# Altium footprint library PCB1.PcbLib: 48 footprints (part 1 of 3)
Each footprint in its own frame and in the unit in brackets; x right, y up, seen from the top. Pads: shape width x height; smd on the part's side, far side on the other; paste and mask are expansions set on the pad; w line width, h text height; cw(c..) or ccw(c..) is an arc to the next point about the centre after c.
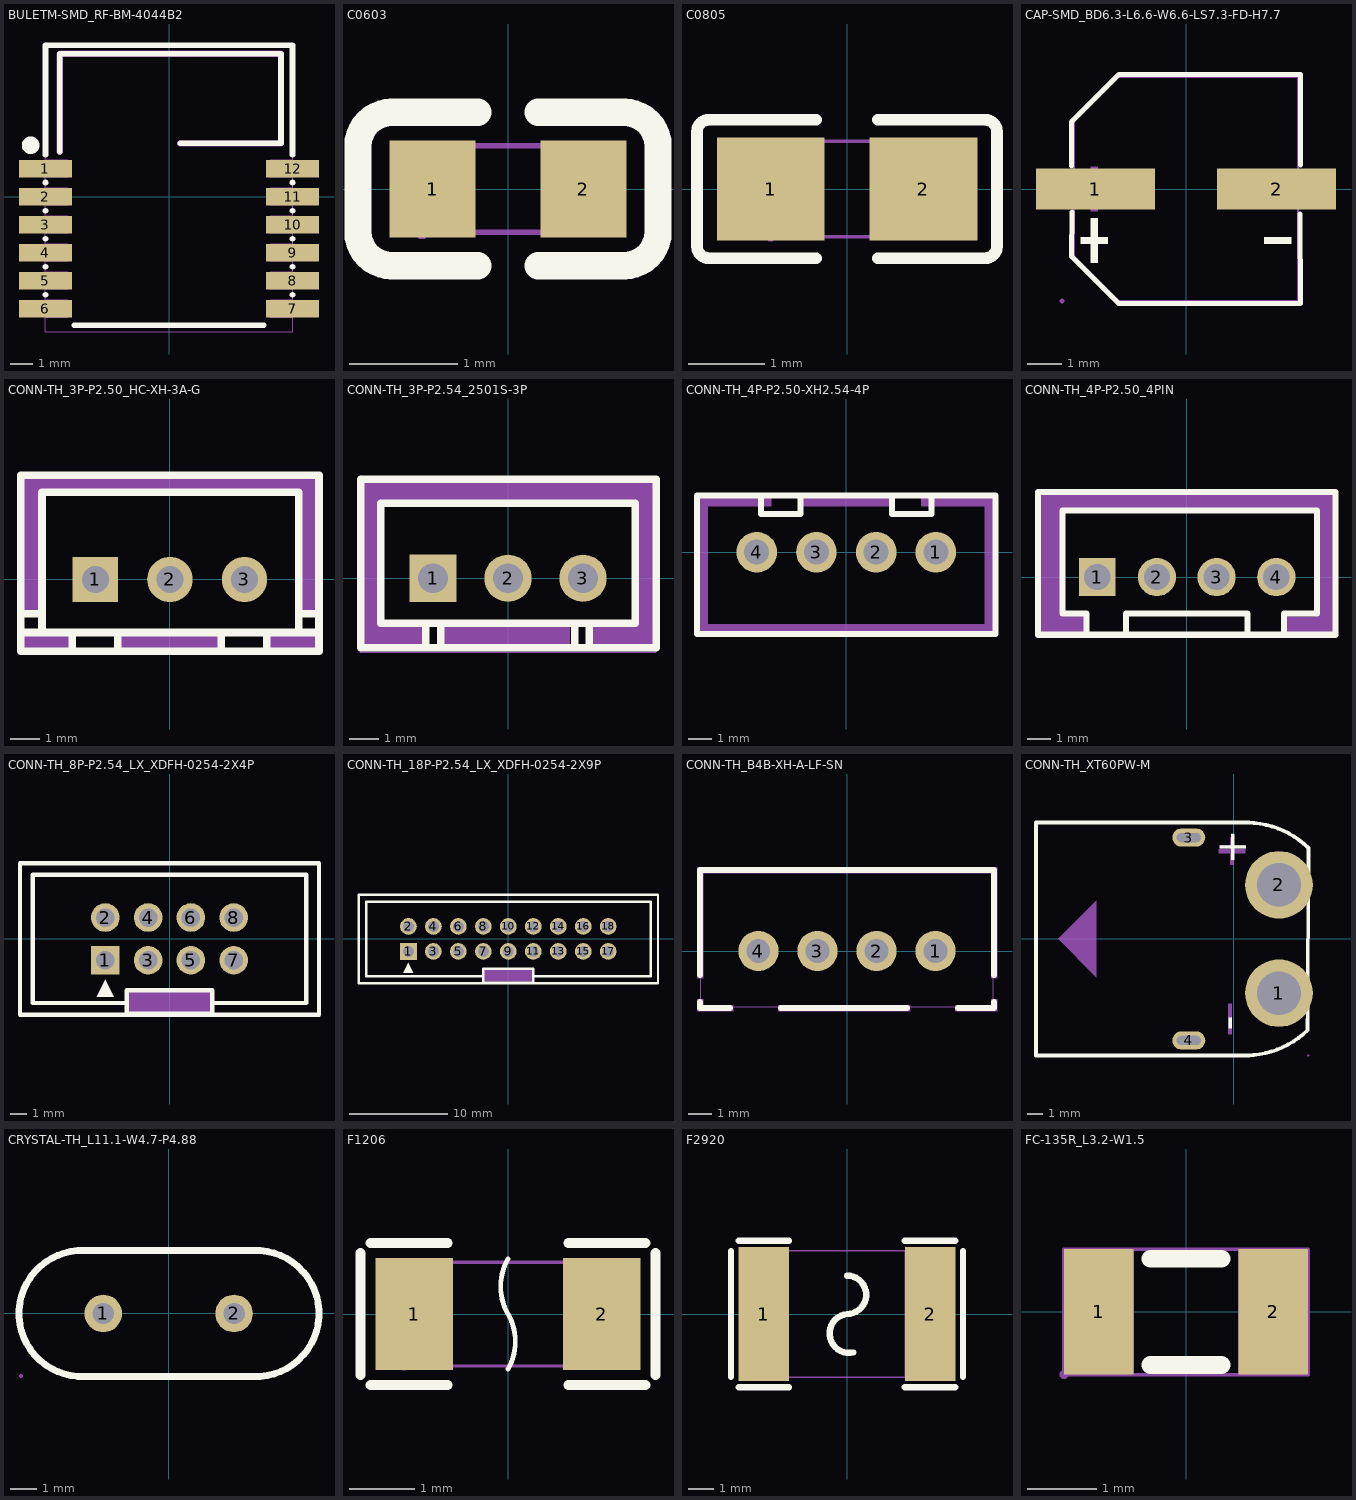
[diagram p0: the footprints below, top view; thin cyan lines are the x and y axes]

## BULETM-SMD_RF-BM-4044B2 [mil]
pads (12):
  rect 94.5x31.5 smd: 1(-220.5,50.5) 2(-220.5,0.5) 3(-220.5,-49.5) 4(-220.5,-99.5) 5(-220.5,-149.5) 6(-220.5,-199.5) 7(220.5,-199.5) 8(220.5,-149.5) 9(220.5,-99.5) 10(220.5,-49.5) 11(220.5,0.5) 12(220.5,50.5)
Top Overlay:
  circle w15.7: c-247.1,92.2 r7.9
  lines w10: -220.5,-174.7 -220.5,-174.4 ; -220.5,-124.7 -220.5,-124.4 ; -220.5,-74.7 -220.5,-74.4 ; -220.5,-24.7 -220.5,-24.4 ; -220.5,25.3 -220.5,25.6 ; -220.5,75.4 -220.5,270.5 220.5,270.5 220.5,225.3 220.5,75.3 ; -195,80.5 -195,255.5 200,255.5 200,95.5 20,95.5 ; -168.8,-229.2 168.8,-229.2 ; 220.5,-174.7 220.5,-174.4 ; 220.5,-124.7 220.5,-124.4 ; 220.5,-74.7 220.5,-74.4 ; 220.5,-24.7 220.5,-24.4 ; 220.5,25.3 220.5,25.6
Mechanical 6:
  circle w15.7: c-220.5,50.5 r7.9
  region: -200,80.5 -200,255.5 -200,256.49 -199.24,258.33 -197.83,259.74 -195.99,260.5 -195,260.5 200,260.5 200.99,260.5 202.83,259.74 204.24,258.33 205,256.49 205,255.5 205,95.5 205,94.51 204.24,92.67 202.83,91.26 200.99,90.5 200,90.5 20,90.5 17.93,90.5 15,93.43 15,97.57 17.93,100.5 20,100.5 195,100.5 195,250.5 -190,250.5 -190,80.5 -190,78.43 -192.93,75.5 -197.07,75.5 -200,78.43 -200,80.5
Mechanical 7:
  lines w2: -220.5,-240.5 -220.5,272.5 220.5,272.5 220.5,-240.5 -220.5,-240.5
Mechanical 8:
  region: -218.1,272.5 -218.1,271.51 -219.51,270.1 -221.49,270.1 -222.9,271.51 -222.9,272.5 -222.9,273.49 -221.49,274.9 -219.51,274.9 -218.1,273.49 -218.1,272.5
Mechanical 9:
  region: 220.5,-183.8 220.5,-215.3 181.1,-215.3 181.1,-183.8
  region: 220.5,-133.8 220.5,-165.3 181.1,-165.3 181.1,-133.8
  region: 220.5,-83.8 220.5,-115.3 181.1,-115.3 181.1,-83.8
  region: 220.5,-33.8 220.5,-65.3 181.1,-65.3 181.1,-33.8
  region: 220.5,16.2 220.5,-15.3 181.1,-15.3 181.1,16.2
  region: 220.5,66.2 220.5,34.7 181.1,34.7 181.1,66.2
  region: -181.1,66.2 -181.1,34.7 -220.5,34.7 -220.5,66.2
  region: -181.1,16.2 -181.1,-15.3 -220.5,-15.3 -220.5,16.2
  region: -181.1,-33.8 -181.1,-65.3 -220.5,-65.3 -220.5,-33.8
  region: -181.1,-83.8 -181.1,-115.3 -220.5,-115.3 -220.5,-83.8
  region: -181.1,-133.8 -181.1,-165.3 -220.5,-165.3 -220.5,-133.8
  region: -181.1,-183.8 -181.1,-215.3 -220.5,-215.3 -220.5,-183.8

## C0603 [mil]
pads (2):
  rect 31.5x35.4 smd: 1(-27.6,0) 2(27.5,0)
Top Overlay:
  lines w10: -11.1,-27.9 -42.6,-27.9 cw(c-42.6,-15.7) -54.8,-15.7 -54.8,15.8 cw(c-42.6,15.8) -42.6,28 -11.1,28 ; 11,-27.9 42.5,-27.9 ccw(c42.5,-15.7) 54.7,-15.7 54.7,15.8 ccw(c42.5,15.8) 42.5,28 11,28
Mechanical 7:
  lines w2: -31.5,-15.7 -31.5,15.8 31.5,15.8 31.5,-15.7 -31.5,-15.7
Mechanical 8:
  region: -29.1,-15.7 -29.1,-16.69 -30.51,-18.1 -32.49,-18.1 -33.9,-16.69 -33.9,-15.7 -33.9,-14.71 -32.49,-13.3 -30.51,-13.3 -29.1,-14.71 -29.1,-15.7 -29.2,-15.7
Mechanical 9:
  region: -31.5,-15.7 -31.5,15.8 -19.7,15.8 -19.7,-15.7
  region: 31.5,-15.7 31.5,15.8 19.6,15.8 19.6,-15.7

## C0805 [mil]
pads (2):
  rect 55.5x53.1 smd paste-3937 mask+2: 1(-39.3,0) 2(39.4,0)
Top Overlay:
  lines w6: -15.8,-35.6 -71.3,-35.6 cw(c-71.3,-29.6) -77.3,-29.6 -77.3,29.6 cw(c-71.3,29.6) -71.3,35.6 -15.8,35.6 ; 15.8,-35.6 71.3,-35.6 ccw(c71.3,-29.6) 77.3,-29.6 77.3,29.6 ccw(c71.3,29.6) 71.3,35.6 15.8,35.6
Top Paste:
  region: 67.2,25.2 67.2,-25.2 65.2,-27.2 19.9,-27.2 17.9,-25.2 17.7,-9.1 35.5,-9.1 35.5,8.7 18.1,8.7 17.9,25.2 19.9,27.2 65.2,27.2
  region: -67.1,-25.2 -67.1,25.2 -65.1,27.2 -19.9,27.2 -17.9,25.2 -17.7,9.1 -35.4,9.1 -35.4,-8.7 -18.1,-8.7 -17.9,-25.2 -19.9,-27.2 -65.1,-27.2
Mechanical 7:
  lines w2: -39.3,-24.6 39.4,-24.6 39.4,24.6 -39.3,24.6 -39.3,-24.6
Mechanical 8:
  region: -36.9,-24.6 -36.9,-25.59 -38.31,-27 -40.29,-27 -41.7,-25.59 -41.7,-24.6 -41.7,-23.61 -40.29,-22.2 -38.31,-22.2 -36.9,-23.61 -36.9,-24.6 -37,-24.6
Mechanical 9:
  region: 39.4,24.6 39.4,-24.6 19.7,-24.6 19.7,24.6
  region: -39.3,-24.6 -39.3,24.6 -19.7,24.6 -19.7,-24.6

## CAP-SMD_BD6.3-L6.6-W6.6-LS7.3-FD-H7.7 [mil]
pads (2):
  rect 137.8x47.2 smd: 1(-105.1,0) 2(105.1,0)
Top Overlay:
  region: -110.4,-33.8 -110.4,-85.8 -102.6,-85.8 -102.6,-33.8
  region: -122.1,-55.9 -122.1,-63.7 -90.9,-63.7 -90.9,-55.9
  region: 122.1,-55.9 122.1,-63.7 91,-63.7 91,-55.9
  lines w6: -132.9,27 -132.9,77.9 -77.9,132.9 132.9,132.9 132.7,27.8 ; -132.4,-27 -132.9,-78 -78,-132.9 132.9,-132.9 132.1,-29.1
Mechanical 6:
  region: -110.4,26 -110.4,-26 -102.6,-26 -102.6,26
  region: -122.1,3.9 -122.1,-3.9 -90.9,-3.9 -90.9,3.9
  region: 122.1,3.9 122.1,-3.9 91,-3.9 91,3.9
Mechanical 7:
  lines w2: -129.9,-78 -129.9,77.9 -77.9,129.9 129.9,129.9 129.9,-129.9 -77.9,-129.9 -129.9,-78
Mechanical 8:
  region: -141.4,-129.9 -141.4,-130.89 -142.81,-132.3 -144.79,-132.3 -146.2,-130.89 -146.2,-129.9 -146.2,-128.91 -144.79,-127.5 -142.81,-127.5 -141.4,-128.91 -141.4,-129.9
Mechanical 9:
  region: 39.3,13.8 143.7,13.8 143.7,-13.8 39.3,-13.8
  region: -143.8,13.8 -39.4,13.8 -39.4,-13.8 -143.8,-13.8

## CONN-TH_3P-P2.50_HC-XH-3A-G [mil]
pads (3):
  rect 60x60 hole 36 paste-99999 mask+2: 1(-98.4,0)
  round 60 hole 36 paste-99999 mask+2: 2(0,0) 3(98.4,0)
Top Overlay:
  lines w10: -196.9,-70 -170,-70 ; -196.9,-45 -170,-45 ; -129,-94.5 -129,-70 ; -69,-94.5 -69,-70 ; 67.9,-94.5 67.9,-70 ; 127.9,-94.5 127.9,-70 ; 170,-45 196.8,-45 ; 196.8,-70 170,-70 ; 170,-70 -168.9,-70 -168.9,115 170,115 170,-70 ; -196.9,-94.5 -196.9,137.8 196.8,137.8 196.8,-94.5 -196.9,-94.5
Mechanical 6:
  region: 196.8,-70 127.9,-70 130,-95 196.8,-94.5
  region: 67.9,-70 70,-95 -69,-94.5 -69,-70
  region: 196.8,-45 170,-45 170,115 -170,115 -170,-45 -196.9,-45 -196.9,137.8 196.8,137.8
  region: -129,-70 -129,-93.4 -130,-94.5 -196.9,-94.5 -196.9,-70
Mechanical 7:
  lines w2: -196.9,-94.5 196.8,-94.5 196.8,137.8 -196.9,137.8 -196.9,-94.5
Mechanical 8:
  region: -194.5,-94.5 -194.5,-95.49 -195.91,-96.9 -197.89,-96.9 -199.3,-95.49 -199.3,-94.5 -199.3,-93.51 -197.89,-92.1 -195.91,-92.1 -194.5,-93.51 -194.5,-94.5
Mechanical 9:
  region: -108.3,9.8 -88.6,9.8 -88.6,-9.9 -108.3,-9.9
  region: -9.9,9.8 9.8,9.8 9.8,-9.9 -9.9,-9.9
  region: 88.6,9.8 108.3,9.8 108.3,-9.9 88.6,-9.9

## CONN-TH_3P-P2.54_2501S-3P [mil]
pads (3):
  rect 63x63 hole 39.4: 1(-100,0)
  round 63 hole 39.4: 2(0,0) 3(100,0)
Top Overlay:
  lines w10: -110,-92.5 -110,-60 ; -89.7,-92.5 -89.7,-60 ; 89.3,-92.5 89.3,-60 ; 108.3,-92.5 108.3,-60 ; -196.1,-92.5 197.6,-92.5 197.6,131.9 -196.1,131.9 -196.1,-92.5 ; -170,-60 -170,100 170,100 170,-60 -170,-60
Mechanical 6:
  region: 110,-90 110,-60 170,-60 170,100 -170,100 -170,-60 -110,-60 -110,-90 -200,-90 -200,130 200,130 200,-90
  region: -87.4,-90.5 82.6,-90.5 82.6,-60.5 -87.4,-60.5
Mechanical 7:
  lines w2: -196.8,-98.4 196.8,-98.4 196.8,133.9 -196.8,133.9 -196.8,-98.4
Mechanical 8:
  region: -194.4,133.9 -194.4,132.91 -195.81,131.5 -197.79,131.5 -199.2,132.91 -199.2,133.9 -199.2,134.89 -197.79,136.3 -195.81,136.3 -194.4,134.89 -194.4,133.9 -194.5,133.9
Mechanical 9:
  region: -112.8,12.8 -87.2,12.8 -87.2,-12.7 -112.8,-12.7
  region: -12.8,12.8 12.8,12.8 12.8,-12.8 -12.8,-12.8
  region: 87.2,12.8 112.8,12.8 112.8,-12.8 87.2,-12.8

## CONN-TH_4P-P2.50-XH2.54-4P [mil]
pads (4):
  round 66.9 hole 41.3 paste-99999 mask+2: 1(147.6,0) 2(49.2,0) 3(-49.2,0) 4(-147.7,0)
Top Overlay:
  lines w10: -246.1,-134.8 -246.1,93.5 246,93.5 246,-134.8 -245.7,-134.8 -246.1,-134.4 ; -140.8,93.5 -140.8,63 -75.3,63 -75.3,91.6 -77.2,93.5 ; 75.3,93.5 75.3,63 140.7,63 140.7,91.6 138.9,93.5
Mechanical 6:
  region: -78.8,91.6 78.7,91.6 78.7,75.8 -78.8,75.8
  region: 246,91.6 246,-134.8 -246.1,-134.8 -246.1,91.6 -123.3,91.6 -123.3,75.8 -228.4,75.8 -228.4,-119 228.3,-119 228.3,75.8 123.2,75.8 123.2,91.6
Mechanical 7:
  lines w2: -246.1,-134.8 -246.1,93.5 246,93.5 246,-134.8 -246.1,-134.8
Mechanical 8:
  region: 248.4,93.5 248.4,92.51 246.99,91.1 245.01,91.1 243.6,92.51 243.6,93.5 243.6,94.49 245.01,95.9 246.99,95.9 248.4,94.49 248.4,93.5
Mechanical 9:
  region: 160.2,-12.6 135,-12.6 135,12.6 160.2,12.6
  region: 61.8,-12.6 36.6,-12.6 36.6,12.6 61.8,12.6
  region: -36.6,-12.6 -61.8,-12.6 -61.8,12.6 -36.6,12.6
  region: -135.1,-12.6 -160.3,-12.6 -160.3,12.6 -135.1,12.6

## CONN-TH_4P-P2.50_4PIN [mil]
pads (4):
  rect 60x63 hole 43.3: 1(-147.7,0)
  round 63 hole 43.3: 2(-49.2,0) 3(49.2,0) 4(147.6,0)
Top Overlay:
  lines w10: -165,-95 -165,-90 -165,-60 -205,-60 -205,110 215,110 215,-60 160,-60 160,-90 ; -100,-95 -100,-60 100,-60 100,-95 ; -245,-95 245,-95 245,140 -245,140 -245,-95
Mechanical 6:
  region: 160,-95 160,-65 210,-65 215,-60 215,110 -205,110 -205,-60 -165,-60 -165,-95 -245,-95 -245,140 245,140 245,-95
Mechanical 7:
  lines w2: -246.1,-94.4 -246.1,137.8 246,137.8 246,-94.4 -246.1,-94.4
Mechanical 8:
  region: -243.7,-94.4 -243.7,-95.39 -245.11,-96.8 -247.09,-96.8 -248.5,-95.39 -248.5,-94.4 -248.5,-93.41 -247.09,-92 -245.11,-92 -243.7,-93.41 -243.7,-94.4
Mechanical 9:
  region: -160.3,12.6 -135.1,12.6 -135.1,-12.6 -160.3,-12.6
  region: -61.8,12.6 -36.6,12.6 -36.6,-12.6 -61.8,-12.6
  region: 36.6,12.6 61.8,12.6 61.8,-12.6 36.6,-12.6
  region: 135,12.6 160.2,12.6 160.2,-12.6 135,-12.6

## CONN-TH_8P-P2.54_LX_XDFH-0254-2X4P [mil]
pads (8):
  rect 66.9x66.9 hole 43.3 paste-99999 mask+2: 1(-150,-50)
  round 66.9 hole 43.3 paste-99999 mask+2: 2(-150,50) 3(-50,-50) 4(-50,50) 5(50,-50) 6(50,50) 7(150,-50) 8(150,50)
Top Overlay:
  region: -150,-95 -130,-135 -170,-135
  lines w10: -100,-150 -320,-150 -320,150 320,150 320,-150 100,-150 ; -349.6,-177.2 -349.6,177.2 349.6,177.2 349.6,-177.2 -349.6,-177.2 ; -100,-175 -100,-120 100,-120 100,-175 -100,-175
Mechanical 6:
  region: -100.4,-177.2 -100.4,-120.1 100.4,-120.1 100.4,-177.2
  region: -150,-95 -130,-135 -170,-135
Mechanical 7:
  lines w2: -349.6,-175.2 349.6,-175.2 349.6,175.2 -349.6,175.2 -349.6,-175.2
Mechanical 8:
  region: -347.2,-175.2 -347.2,-176.19 -348.61,-177.6 -350.59,-177.6 -352,-176.19 -352,-175.2 -352,-174.21 -350.59,-172.8 -348.61,-172.8 -347.2,-174.21 -347.2,-175.2 -347.3,-175.2
Mechanical 9:
  region: 137.4,62.6 162.6,62.6 162.6,37.4 137.4,37.4
  region: 137.4,-37.4 162.6,-37.4 162.6,-62.6 137.4,-62.6
  region: 37.4,62.6 62.6,62.6 62.6,37.4 37.4,37.4
  region: 37.4,-37.4 62.6,-37.4 62.6,-62.6 37.4,-62.6
  region: -62.6,62.6 -37.4,62.6 -37.4,37.4 -62.6,37.4
  region: -62.6,-37.4 -37.4,-37.4 -37.4,-62.6 -62.6,-62.6
  region: -162.6,62.6 -137.4,62.6 -137.4,37.4 -162.6,37.4
  region: -162.6,-37.4 -137.4,-37.4 -137.4,-62.6 -162.6,-62.6

## CONN-TH_18P-P2.54_LX_XDFH-0254-2X9P [mil]
pads (18):
  rect 66.9x66.9 hole 43.3: 1(-400,-50)
  round 66.9 hole 43.3: 2(-400,50) 3(-300,-50) 4(-300,50) 5(-200,-50) 6(-200,50) 7(-100,-50) 8(-100,50) 9(0,-50) 10(0,50) 11(100,-50) 12(100,50) 13(200,-50) 14(200,50) 15(300,-50) 16(300,50) 17(399.9,-50) 18(399.9,50)
Top Overlay:
  region: -400,-95 -380,-135 -420,-135
  lines w10: -100,-150 -570,-150 -570,150 569.9,150 ; 100,-150 570,-150 570,150 ; -599.7,-177.1 -599.7,177.2 599.6,177.2 599.6,-177.1 -599.7,-177.1 ; -100,-175 -100,-120 100,-120 100,-175 -100,-175
Mechanical 6:
  region: -100,-120 100,-120 100,-170 -100,-170
Mechanical 7:
  lines w2: -599.7,-175.2 599.6,-175.2 599.6,175.2 -599.7,175.2 -599.7,-175.2
Mechanical 8:
  region: -597.3,-175.2 -597.3,-176.19 -598.71,-177.6 -600.69,-177.6 -602.1,-176.19 -602.1,-175.2 -602.1,-174.21 -600.69,-172.8 -598.71,-172.8 -597.3,-174.21 -597.3,-175.2
Mechanical 9:
  region: -412.6,-37.4 -387.5,-37.4 -387.5,-62.6 -412.6,-62.6
  region: -412.6,62.6 -387.5,62.6 -387.5,37.4 -412.6,37.4
  region: -312.6,-37.4 -287.5,-37.4 -287.5,-62.6 -312.6,-62.6
  region: -312.6,62.6 -287.5,62.6 -287.5,37.4 -312.6,37.4
  region: -212.6,-37.4 -187.5,-37.4 -187.5,-62.6 -212.6,-62.6
  region: -212.6,62.6 -187.5,62.6 -187.5,37.4 -212.6,37.4
  region: -112.6,-37.4 -87.5,-37.4 -87.5,-62.6 -112.6,-62.6
  region: -112.6,62.6 -87.5,62.6 -87.5,37.4 -112.6,37.4
  region: -12.6,-37.4 12.5,-37.4 12.5,-62.6 -12.6,-62.6
  region: -12.6,62.6 12.5,62.6 12.5,37.4 -12.6,37.4
  region: 87.4,-37.4 112.5,-37.4 112.5,-62.6 87.4,-62.6
  region: 87.4,62.6 112.5,62.6 112.5,37.4 87.4,37.4
  region: 187.4,-37.4 212.5,-37.4 212.5,-62.6 187.4,-62.6
  region: 187.4,62.6 212.5,62.6 212.5,37.4 187.4,37.4
  region: 287.4,-37.4 312.5,-37.4 312.5,-62.6 287.4,-62.6
  region: 287.4,62.6 312.5,62.6 312.5,37.4 287.4,37.4
  region: 387.4,-37.4 412.5,-37.4 412.5,-62.6 387.4,-62.6
  region: 387.4,62.6 412.5,62.6 412.5,37.4 387.4,37.4

## CONN-TH_B4B-XH-A-LF-SN [mil]
pads (4):
  round 66.9 hole 39.4: 1(147.6,0) 2(49.2,0) 3(-49.2,0) 4(-147.7,0)
Top Overlay:
  lines w10: -245,-85 -245,-95 -195,-95 ; -245,-40 -245,135 245,135 245,-40 ; -110,-95 100,-95 ; 185,-95 245,-95 245,-85
Mechanical 6:
  region: 105,-100 105,-90 -115,-90 -115,-100
  region: 180,-100 250,-100 250,-80 240,-80 240,-90 180,-90
  region: -190,-100 -250,-100 -250,-80 -240,-80 -240,-90 -190,-90
  region: -240,-45 -240,130 240,130 240,-45 250,-45 250,140 -250,140 -250,-45
Mechanical 7:
  lines w2: -244.1,-92.6 -244.1,133.8 244.1,133.8 244.1,-92.6 -244.1,-92.6
Mechanical 8:
  region: -241.7,-92.6 -241.7,-93.59 -243.11,-95 -245.09,-95 -246.5,-93.59 -246.5,-92.6 -246.5,-91.61 -245.09,-90.2 -243.11,-90.2 -241.7,-91.61 -241.7,-92.6
Mechanical 9:
  region: -135.1,-12.6 -160.3,-12.6 -160.3,12.6 -135.1,12.6
  region: -36.6,-12.6 -61.8,-12.6 -61.8,12.6 -36.6,12.6
  region: 61.8,-12.6 36.6,-12.6 36.6,12.6 61.8,12.6
  region: 160.2,-12.6 135,-12.6 135,12.6 160.2,12.6

## CONN-TH_XT60PW-M [mm]
pads (4):
  round 4.5 hole 2.901 paste-2539.97 mask+0.051: 1(3,-3.602) 2(3,3.599)
  oval 2.2x1.199 hole 0.599 slot 1.6 at 0 deg paste-2539.97 mask+0.051: 3(-3,6.749) 4(-3,-6.751)
Top Overlay:
  lines w0.254: 0.893,-7.748 ccw(c0.747,-1.75) 4.914,-6.066 ; 0.942,7.745 cw(c0.795,1.748) 4.963,6.063 ; 1.001,-7.75 -13.165,-7.75 -13.165,7.75 1.001,7.75 ; 4.902,-5.994 4.91,-4.544 ; 4.92,-2.677 4.948,2.738 ; 4.956,4.44 4.966,6.06
  text "+" at 0.81,4.953 h2.03
  text "-" at 0.556,-6.096 h2.03
Mechanical 6:
  region: -0.381,-4.318 -0.127,-4.318 -0.127,-6.35 -0.381,-6.35
  region: -0.254,6.731 0,6.731 0,5.969 0.762,5.969 0.762,5.715 0,5.715 0,4.953 -0.254,4.953 -0.254,5.715 -1.016,5.715 -1.016,5.969 -0.254,5.969
  region: -9.144,2.54 -9.144,-2.54 -11.684,0
Mechanical 7:
  lines w0.051: -13.165,-7.747 -13.165,7.747 1.016,7.747 1.778,7.62 2.794,7.366 3.81,6.858 4.826,6.096 4.953,5.969 4.902,-5.994 4.699,-6.223 3.937,-6.858 3.175,-7.239 2.159,-7.493 1.143,-7.747 -13.165,-7.747
Mechanical 8:
  region: 5.014,-7.747 5.014,-7.772 4.978,-7.808 4.928,-7.808 4.892,-7.772 4.892,-7.747 4.892,-7.722 4.928,-7.686 4.978,-7.686 5.014,-7.722 5.014,-7.747
Mechanical 9:
  region: -2.4,-6.551 -2.4,-6.949 -3.599,-6.949 -3.599,-6.551
  region: -2.4,6.949 -2.4,6.551 -3.599,6.551 -3.599,6.949
  region: 4,-3.602 4,-3.733 3.932,-3.988 3.801,-4.216 3.614,-4.403 3.386,-4.534 3.131,-4.602 2.868,-4.602 2.613,-4.534 2.385,-4.403 2.199,-4.216 2.067,-3.988 1.999,-3.733 1.999,-3.602 1.999,-3.47 2.067,-3.215 2.199,-2.987 2.385,-2.801 2.613,-2.669 2.868,-2.601 3.131,-2.601 3.386,-2.669 3.614,-2.801 3.801,-2.987 3.932,-3.215 4,-3.47 4,-3.602
  region: 4,3.599 4,3.467 3.932,3.213 3.801,2.985 3.614,2.798 3.386,2.667 3.131,2.598 2.868,2.598 2.613,2.667 2.385,2.798 2.199,2.985 2.067,3.213 1.999,3.467 1.999,3.599 1.999,3.731 2.067,3.985 2.199,4.214 2.385,4.4 2.613,4.532 2.868,4.6 3.131,4.6 3.386,4.532 3.614,4.4 3.801,4.214 3.932,3.985 4,3.731 4,3.599

## CRYSTAL-TH_L11.1-W4.7-P4.88 [mil]
pads (2):
  round 55.1 hole 31.5 paste-99999 mask+2: 1(-96.1,0) 2(96,0)
Top Overlay:
  lines w10: -123.75,-92.53 cw(c-127.3,0) -123.75,92.53 ; -123.6,-92.5 124.4,-92.5 ; -123.6,92.5 124.4,92.5 ; 124.32,-92.52 ccw(c128.2,0) 124.32,92.52
Mechanical 7:
  lines w2: -216.9,0 cw(c-125.2,0) -125.2,91.7 125.6,91.7 126.3,91.7 cw(c126.3,0) 218,0 cw(c126.3,0) 126.3,-91.7 -122.5,-91.7 -125.2,-91.7 cw(c-125.2,0) -216.9,0
Mechanical 8:
  region: -214.6,-91.7 -214.6,-92.69 -216.01,-94.1 -217.99,-94.1 -219.4,-92.69 -219.4,-91.7 -219.4,-90.71 -217.99,-89.3 -216.01,-89.3 -214.6,-90.71 -214.6,-91.7
Mechanical 9:
  region: 104.5,0 104.5,-1.69 103.21,-4.81 100.81,-7.21 97.69,-8.5 94.31,-8.5 91.19,-7.21 88.79,-4.81 87.5,-1.69 87.5,0 87.5,1.69 88.79,4.81 91.19,7.21 94.31,8.5 97.69,8.5 100.81,7.21 103.21,4.81 104.5,1.69 104.5,0
  region: -87.6,0 -87.6,-1.69 -88.89,-4.81 -91.29,-7.21 -94.41,-8.5 -97.79,-8.5 -100.91,-7.21 -103.31,-4.81 -104.6,-1.69 -104.6,0 -104.6,1.69 -103.31,4.81 -100.91,7.21 -97.79,8.5 -94.41,8.5 -91.29,7.21 -88.89,4.81 -87.6,1.69 -87.6,0

## F1206 [mil]
pads (2):
  rect 46.9x68 smd: 1(-56.9,0) 2(56.9,0)
Top Overlay:
  lines w3: -0.04,0.05 cw(c28.8,16.7) -0.04,33.35 ; 0.04,-33.25 ccw(c-28.8,-16.6) 0.04,0.05
  lines w6: -89.3,-37 -89.3,37.1 ; -83.3,-43 -36.5,-43 ; -83.3,43.1 -36.5,43.1 ; 36.5,-43 83.3,-43 ; 36.5,43.1 83.3,43.1 ; 89.3,-37 89.3,37.1
Mechanical 7:
  lines w2: -63,-31.5 63,-31.5 63,31.5 -63,31.5 -63,-31.5
Mechanical 8:
  region: -60.6,-31.5 -60.6,-32.49 -62.01,-33.9 -63.99,-33.9 -65.4,-32.49 -65.4,-31.5 -65.4,-30.51 -63.99,-29.1 -62.01,-29.1 -60.6,-30.51 -60.6,-31.5
Mechanical 9:
  region: -63,-31.5 -43.3,-31.5 -43.3,31.5 -63,31.5
  region: 43.3,-31.5 63,-31.5 63,31.5 43.3,31.5

## F2920 [mil]
pads (2):
  rect 78.7x208.7 smd: 1(-129.9,0) 2(129.9,0)
Top Overlay:
  lines w10: -181.1,-98.4 -181.1,98.4 ; -169.3,-114.2 -90.6,-114.2 ; -169.3,114.2 -90.6,114.2 ; -0.05,0.02 ccw(c3.3,-30.3) 9.95,-60.07 ; 0,0 ccw(c0,30) 0,60 ; 90.5,-114.2 169.3,-114.2 ; 90.5,114.2 169.3,114.2 ; 181.1,-98.4 181.1,98.4
Mechanical 7:
  lines w2: -145.7,-98.4 145.7,-98.4 145.7,98.4 -145.7,98.4 -145.7,-98.4
Mechanical 8:
  region: -143.3,-98.5 -143.3,-99.49 -144.71,-100.9 -146.69,-100.9 -148.1,-99.49 -148.1,-98.5 -148.1,-97.51 -146.69,-96.1 -144.71,-96.1 -143.3,-97.51 -143.3,-98.5
Mechanical 9:
  region: -145.7,98.4 -90.6,98.4 -90.6,-98.4 -145.7,-98.4
  region: 145.7,-98.4 90.5,-98.4 90.5,98.4 145.7,98.4

## FC-135R_L3.2-W1.5 [mil]
pads (2):
  rect 39.4x70.9 smd: 1(-49.2,0) 2(49.2,0)
Top Overlay:
  lines w10: -20,-30 20,-30 ; -20,30 20,30
Mechanical 7:
  lines w2: -68.9,-35.4 68.9,-35.4 68.9,35.4 -68.9,35.4 -68.9,-35.4
Mechanical 8:
  region: -66.5,-35.4 -66.5,-36.39 -67.91,-37.8 -69.89,-37.8 -71.3,-36.39 -71.3,-35.4 -71.3,-34.41 -69.89,-33 -67.91,-33 -66.5,-34.41 -66.5,-35.4
Mechanical 9:
  region: -68.9,-35.4 -68.9,35.4 -29.5,35.4 -29.5,-35.4
  region: 29.5,-35.4 29.5,35.4 68.9,35.4 68.9,-35.4